# Altium schematic symbol library SI2319CDS-T1-GE3.SchLib: 1 symbol
Pins are listed as number, name and electrical type; pins without a type are passive.

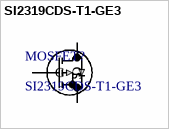
[diagram p0: symbol SI2319CDS-T1-GE3]

## SI2319CDS-T1-GE3
designator MOSFET?
P-CHANNEL 40-V (D-S) MOSFET; Manufacturer_Name: Vishay; Copyright: Copyright (C) 2026 Ultra Librarian. All rights reserved.; Manufacturer_Part_Number: SI2319CDS-T1-GE3; Datasheet: https://www.vishay.com/doc?66709
footprint SOT-23-3_TO-236_VIS
pins: 1 G, 2 S, 3 D